# Altium schematic symbol library SnapEDAsch.SchLib: 1 symbol
Pins are listed as number, name and electrical type; pins without a type are passive.

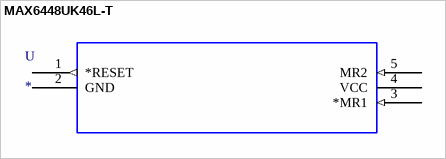
[diagram p0: symbol MAX6448UK46L-T]

## MAX6448UK46L-T
designator U
Processor Supervisor 4.63V 1V to 5.5V 5-Pin SOT-23 T/R; MF: Maxim Integrated; MP: MAX6448UK46L+T; SnapEDA_Link: https://www.snapeda.com/parts/MAX6448UK46L+T/Maxim%20Integrated/view-part/647379/?ref=snap; Price: None; Availability: Unavailable; Package: SOT-23-5 Maxim Integrated; Value: *
footprint 21-0057F
pins: 1 *RESET (out), 2 GND (power), 3 *MR1 (in), 4 VCC (power), 5 MR2 (in)